# Altium footprint library 3phase four-wire_inductor.PcbLib: 1 footprints
Each footprint in its own frame and in the unit in brackets; x right, y up, seen from the top. Pads: shape width x height; smd on the part's side, far side on the other; paste and mask are expansions set on the pad; w line width, h text height; cw(c..) or ccw(c..) is an arc to the next point about the centre after c.
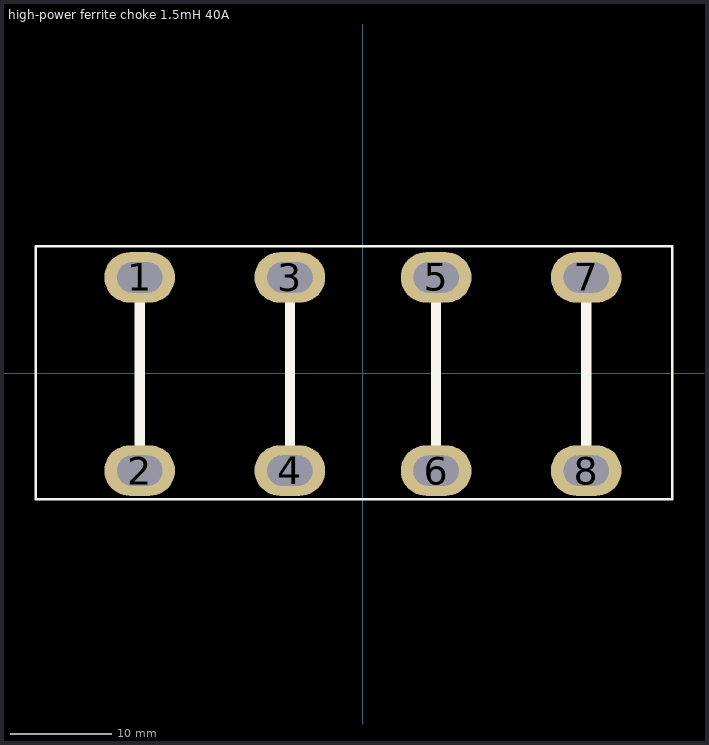
[diagram p0: the footprint, top view; thin cyan lines are the x and y axes]

## high-power ferrite choke 1.5mH 40A [mm] "Three-phase four-wire common mode inductor, high-power ferrite choke 1.5mH 40A, four-phase filter choke"
pads (8):
  oval 7x5 hole 3 slot 4.5 at 0 deg: 1(-22.098,9.5) 2(-22.098,-9.627) 3(-7.239,9.5) 4(-7.239,-9.627) 5(7.239,9.5) 6(7.239,-9.627) 7(22.098,9.5) 8(22.098,-9.627)
Top Overlay:
  lines w0.254: -32.385,-12.446 30.607,-12.446 30.607,12.573 -32.385,12.573 -32.385,-12.446
  lines w1: -22.098,-9.627 -22.098,9.5 ; -7.239,-9.627 -7.239,9.5 ; 7.239,-9.627 7.239,9.5 ; 22.098,-9.627 22.098,9.5
3D body "Синфазный трёхфазный + 0.x_t": height 58.36, standoff -12.85, extent -34.744,-12.5 32.393,12.5